# Altium footprint library PcbLib1_Source_IoT.PcbLib: 61 footprints (part 4 of 4)
Each footprint in its own frame and in the unit in brackets; x right, y up, seen from the top. Pads: shape width x height; smd on the part's side, far side on the other; paste and mask are expansions set on the pad; w line width, h text height; cw(c..) or ccw(c..) is an arc to the next point about the centre after c.
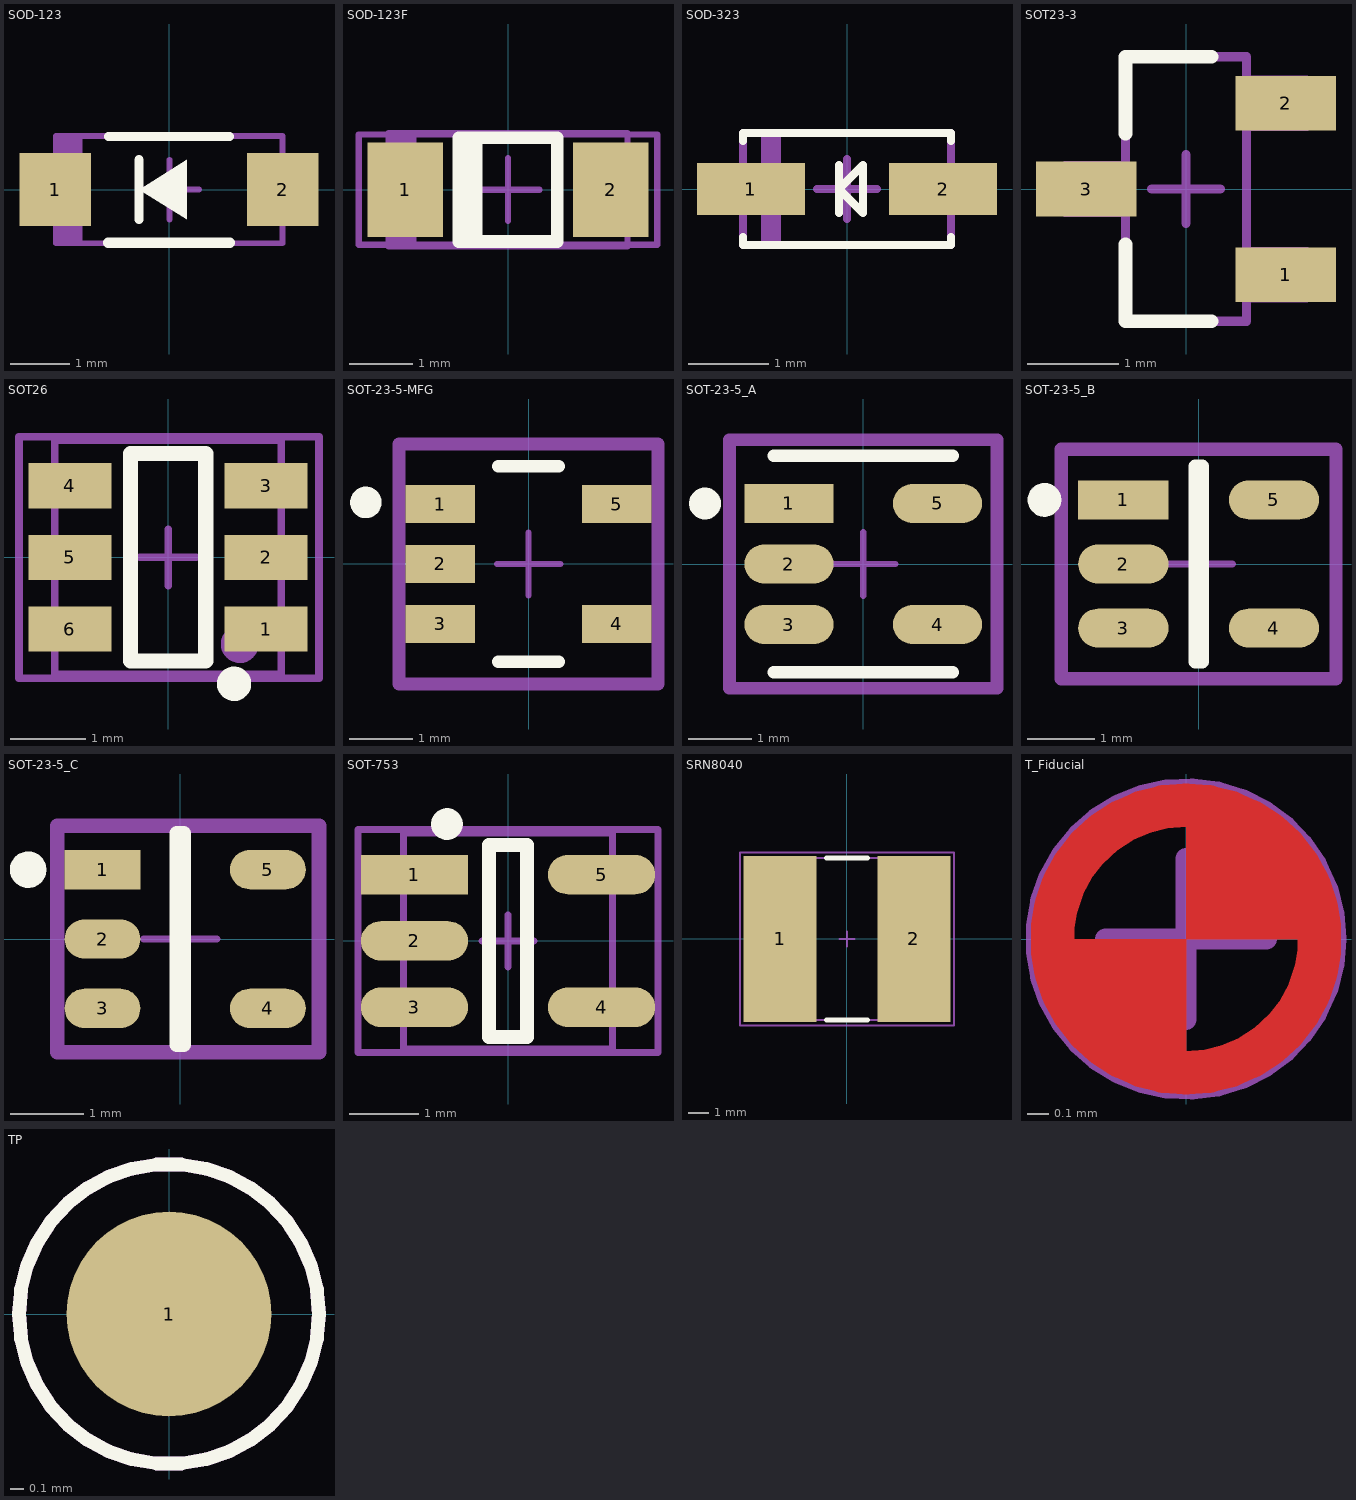
[diagram p3: the footprints below, top view; thin cyan lines are the x and y axes]

## SOD-123 [mm] "On Semi recommended land pattern"
height 1.35
pads (2):
  rect 1.2x1.22 smd: 1(-1.905,0) 2(1.905,0)
Top Overlay:
  region: 0.3,-0.5 0.3,0.5 -0.5,0
  lines w0.152: -1.016,0.889 1.016,0.889 ; -0.5,-0.5 -0.5,0.5
  lines w0.178: -1.016,-0.889 1.016,-0.889
Top Assembly:
  rectangle: -1.901,-0.9 -1.45,0.919
  lines w0.1: -1.895,-0.9 1.905,-0.9 1.905,0.9 -1.895,0.9 -1.895,-0.9
  text "'.Designator'" at -0.97,-0.371 h1.2
Mechanical:
  lines w0.1: -0.495,0 0.505,0 ; 0.005,-0.5 0.005,0.5
3D body "SOD-123.stp": height 1.35, standoff 0, extent -1.932,-0.9 1.932,0.9

## SOD-123F [mm]
pads (2):
  rect 1.2x1.5 smd: 1(-1.635,0) 2(1.635,0)
Top Overlay:
  lines w0.2: -0.655,-0.825 -0.655,0.825 ; -0.505,-0.825 -0.505,0.825 ; -0.78,-0.825 0.78,-0.825 0.78,0.825 -0.78,0.825 -0.78,-0.825
Top Assembly:
  rectangle: -1.906,-0.9 -1.455,0.919
  lines w0.1: -1.9,-0.9 -1.9,0.9 1.9,0.9 1.9,-0.9 -1.9,-0.9
  text "'.Designator'" at -0.975,-0.371 h1.2
Mechanical:
  lines w0.1: -0.5,0 0.5,0 ; 0,-0.5 0,0.5 ; -2.375,-0.875 2.375,-0.875 2.375,0.875 -2.375,0.875 -2.375,-0.875
3D body "User Library-SOD-123F.SLDPRT": height 1.02, standoff 0, extent -1.9,-0.9 1.9,0.9

## SOD-323 [mm]
pads (2):
  rect 1.35x0.65 smd: 1(-1.2,0) 2(1.2,0)
Top Overlay:
  lines w0.1: -1.3,-0.6 -1.3,-0.7 1.3,-0.7 1.3,-0.6 ; -1.3,0.6 -1.3,0.7 1.3,0.7 1.3,0.6 ; -0.1,-0.3 -0.1,0 ; -0.1,0.3 -0.1,0 ; -0.1,0 0.2,-0.3 0.2,0.3 -0.1,0
Top Assembly:
  rectangle: -1.075,-0.7 -0.825,0.7
  lines w0.1: -1.3,-0.7 -1.3,0.7 1.3,0.7 1.3,-0.7 -1.3,-0.7
  text "'.Designator'" at -0.675,-0.371 h1.2
Mechanical:
  lines w0.1: -0.375,0 0.375,0 ; 0,-0.375 0,0.375 ; -1.3,-0.7 1.3,-0.7 1.3,0.7 -1.3,0.7 -1.3,-0.7
3D body "User Library-SOD-323.step": height 1.1, standoff 0, extent -1.3,-0.675 1.3,0.675

## SOT23-3 [mm]
pads (3):
  rect 1.1x0.6 smd: 1(1.092,-0.94) 2(1.092,0.94) 3(-1.092,0)
Top Overlay:
  lines w0.152: -0.66,-0.61 -0.66,-1.448 0.279,-1.448 ; -0.66,0.61 -0.66,1.448 0.279,1.448
Top Assembly:
  lines w0.1: -1.321,-0.254 -0.66,-0.254 -0.66,0.254 -1.321,0.254 -1.321,-0.254 ; -0.66,-1.448 0.66,-1.448 0.66,1.448 -0.66,1.448 -0.66,-1.448 ; 0.66,-1.194 1.321,-1.194 1.321,-0.686 0.66,-0.686 0.66,-1.194 ; 0.66,0.686 1.321,0.686 1.321,1.194 0.66,1.194 0.66,0.686
  text "'.Designator'" at 0.35,-0.925 h1.2
Mechanical:
  lines w0.1: -0.375,0 0.375,0 ; 0,-0.375 0,0.375 ; -1.321,-0.254 -1.321,0.254 -0.66,0.254 -0.66,-0.254 -1.321,-0.254 ; -0.66,-1.448 -0.66,1.448 0.66,1.448 0.66,-1.448 -0.66,-1.448 ; 0.66,-1.194 0.66,-0.686 1.321,-0.686 1.321,-1.194 0.66,-1.194 ; 0.66,0.686 0.66,1.194 1.321,1.194 1.321,0.686 0.66,0.686
3D body "LM3480IM3-12.STEP": height 1.12, standoff 0, extent -1.185,-1.46 1.185,1.46

## SOT26 [mm]
pads (6):
  rect 1.1x0.6 smd: 1(1.3,-0.95) 2(1.3,0) 3(1.3,0.95) 4(-1.3,0.95) 5(-1.3,0) 6(-1.3,-0.95)
Top Overlay:
  circle w0.254: c0.875,-1.675 r0.1
  lines w0.2: -0.5,-1.375 0.5,-1.375 0.5,1.375 -0.5,1.375 -0.5,-1.375
Top Assembly:
  circle w0.25: c0.95,-1.15 r0.125
  lines w0.1: -1.5,-1.55 1.5,-1.55 1.5,1.55 -1.5,1.55 -1.5,-1.55
  text "'.Designator'" at 0.35,-0.85 h1.2
Mechanical:
  lines w0.1: -0.375,0 0.375,0 ; 0,-0.375 0,0.375 ; -1.975,-1.6 -1.975,1.6 2,1.6 2,-1.6 -1.975,-1.6
3D body "SOT26_DIO.step": height 1.4, standoff 0, extent -1.499,-1.549 1.499,1.549

## SOT-23-5-MFG [mm]
pads (5):
  rect 1.1x0.6 smd paste+0 mask+0: 1(-1.4,0.95) 2(-1.4,0) 3(-1.4,-0.95) 4(1.4,-0.95) 5(1.4,0.95)
Top Overlay:
  circle w0.25: c-2.575,0.975 r0.125
  lines w0.2: -0.475,-1.55 0.475,-1.55 ; -0.475,1.55 0.475,1.55
Top Assembly:
  circle w0.25: c-1.45,0.95 r0.125
  lines w0.2: -2.05,-1.9 -2.05,1.9 2.05,1.9 2.05,-1.9 -2.05,-1.9
  text ".Designator" at 0,-0.001 h1
Mechanical:
  lines w0.1: -0.5,0 0.5,0 ; 0,-0.5 0,0.5
  lines w0.2: -2.05,-1.9 -2.05,1.9 2.05,1.9 2.05,-1.9 -2.05,-1.9
3D body "mcp73831t-2aci_ot.stp": height 1.17, standoff 0, extent -1.4,-1.494 1.4,1.494

## SOT-23-5_A [mm]
pads (5):
  rect 1.4x0.618 smd paste+0 mask+0: 1(-1.166,0.95)
  rrect100% 1.4x0.618 smd paste+0 mask+0: 2(-1.166,0) 3(-1.166,-0.95) 4(1.166,-0.95) 5(1.166,0.95)
Top Overlay:
  circle w0.25: c-2.485,0.95 r0.125
  lines w0.2: -1.4,-1.7 1.4,-1.7 ; -1.4,1.7 1.4,1.7
Top Assembly:
  circle w0.25: c-1.45,1 r0.125
  lines w0.2: -2.1,-1.95 2.1,-1.95 2.1,1.95 -2.1,1.95 -2.1,-1.95
  text ".Designator" at 0,0.188 h1
Mechanical:
  lines w0.1: -0.5,0 0.5,0 ; 0,-0.5 0,0.5
  lines w0.2: -2.1,-1.95 2.1,-1.95 2.1,1.95 -2.1,1.95 -2.1,-1.95
3D body "mcp73831t-2aci_ot.stp": height 1.17, standoff 0, extent -1.4,-1.494 1.4,1.494

## SOT-23-5_B [mm]
pads (5):
  rect 1.338x0.578 smd paste+0 mask+0: 1(-1.116,0.95)
  rrect100% 1.338x0.578 smd paste+0 mask+0: 2(-1.116,0) 3(-1.116,-0.95) 4(1.116,-0.95) 5(1.116,0.95)
Top Overlay:
  circle w0.25: c-2.285,0.95 r0.125
  lines w0.2: -0.053,-1.45 -0.053,1.45 0.053,1.45 0.053,-1.45 -0.053,-1.45
Top Assembly:
  circle w0.25: c-1.4,0.95 r0.125
  lines w0.2: -2.035,-1.7 2.035,-1.7 2.035,1.7 -2.035,1.7 -2.035,-1.7
  text ".Designator" at 0,0.188 h1
Mechanical:
  lines w0.1: -0.5,0 0.5,0 ; 0,-0.5 0,0.5
  lines w0.2: -2.035,-1.7 2.035,-1.7 2.035,1.7 -2.035,1.7 -2.035,-1.7
3D body "mcp73831t-2aci_ot.stp": height 1.17, standoff 0, extent -1.4,-1.494 1.4,1.494

## SOT-23-5_C [mm]
pads (5):
  rect 1.038x0.538 smd paste+0 mask+0: 1(-1.066,0.95)
  rrect100% 1.038x0.538 smd paste+0 mask+0: 2(-1.066,0) 3(-1.066,-0.95) 4(1.2,-0.95) 5(1.2,0.95)
Top Overlay:
  circle w0.25: c-2.085,0.95 r0.125
  lines w0.2: -0.047,-1.45 0.047,-1.45 0.047,1.45 -0.047,1.45 -0.047,-1.45
Top Assembly:
  circle w0.25: c-1.1,0.95 r0.125
  lines w0.2: -1.685,-1.55 1.9,-1.55 1.9,1.55 -1.685,1.55 -1.685,-1.55
  text ".Designator" at 0,0.188 h1
Mechanical:
  lines w0.1: -0.5,0 0.5,0 ; 0,-0.5 0,0.5
  lines w0.2: -1.685,-1.55 1.9,-1.55 1.9,1.55 -1.685,1.55 -1.685,-1.55
3D body "mcp73831t-2aci_ot.stp": height 1.17, standoff 0, extent -1.4,-1.494 1.4,1.494

## SOT-753 [mm]
pads (5):
  rect 1.54x0.566 smd: 1(-1.341,0.95)
  rrect100% 1.54x0.566 smd: 2(-1.341,0) 3(-1.341,-0.95) 4(1.341,-0.95) 5(1.341,0.95)
Top Overlay:
  circle w0.254: c-0.875,1.675 r0.1
  lines w0.2: -0.275,-1.375 -0.275,1.375 0.275,1.375 0.275,-1.375 -0.275,-1.375
Top Assembly:
  circle w0.25: c-0.9,0.95 r0.125
  lines w0.1: -1.5,-1.55 1.5,-1.55 1.5,1.55 -1.5,1.55 -1.5,-1.55
  text "'.Designator'" at -0.35,0.85 h1.2
Mechanical:
  lines w0.1: -0.375,0 0.375,0 ; 0,-0.375 0,0.375 ; -2.15,-1.6 2.15,-1.6 2.15,1.6 -2.15,1.6 -2.15,-1.6
3D body "User Library-SOT-23-5.STEP": height 1.46, standoff 0, extent -1.5,-1.475 1.5,1.525

## SRN8040 [mm]
pads (2):
  rect 3.6x8.2 smd: 1(-3.3,0) 2(3.3,0)
Top Overlay:
  lines w0.254: -1,-4 1,-4 ; -1,4 1,4
Top Assembly:
  lines w0.1: -4.025,-4 4.025,-4 4.025,4 -4.025,4 -4.025,-4
  text "'.Designator'" at -1.425,-0.55 h2
Mechanical:
  lines w0.1: -0.375,0 0.375,0 ; 0,-0.375 0,0.375 ; -5.275,-4.275 5.275,-4.275 5.275,4.275 -5.275,4.275 -5.275,-4.275
3D body "User Library-Inductor SRN8040 Series.step": height -1.8, standoff -5.8, extent -4.009,-4 4.009,4

## T_Fiducial [mm] "Fiducial"
Top Layer:
  region: 0,0 0,-0.625 -0.124,-0.625 -0.354,-0.53 -0.53,-0.354 -0.625,-0.124 -0.625,0
  region: 0,0 0,0.625 0.124,0.625 0.354,0.53 0.53,0.354 0.625,0.124 0.625,0
  lines w0.203: 0,-0.625 ccw(c0,0) 0,0.625 ccw(c0,0) 0,-0.625
Top Solder:
  circle w0.203: c0,0 r0.625
  region: 0,-0.625 -0.124,-0.625 -0.354,-0.53 -0.53,-0.354 -0.625,-0.124 -0.625,0 -0.625,0.124 -0.53,0.354 -0.354,0.53 -0.124,0.625 0,0.625 0.124,0.625 0.354,0.53 0.53,0.354 0.625,0.124 0.625,0 0.625,-0.124 0.53,-0.354 0.354,-0.53 0.124,-0.625
Mechanical:
  circle w0.1: c0,0 r0.7
  lines w0.1: -0.375,0 0.375,0 ; 0,-0.375 0,0.375

## TP [mm]
pads (1):
  round 1.5 smd mask+0.2: 1(0,0)
Top Overlay:
  circle w0.1: c0,0 r1.1
Top Assembly:
  circle w0.1: c0,0 r0.65
Mechanical:
  circle w0.1: c0,0 r1.1
  lines w0.1: -0.375,0 0.375,0 ; 0,-0.375 0,0.375